# Altium footprint library SamacSys.PcbLib: 1008 footprints (part 47 of 63)
Each footprint in its own frame and in the unit in brackets; x right, y up, seen from the top. Pads: shape width x height; smd on the part's side, far side on the other; paste and mask are expansions set on the pad; w line width, h text height; cw(c..) or ccw(c..) is an arc to the next point about the centre after c.
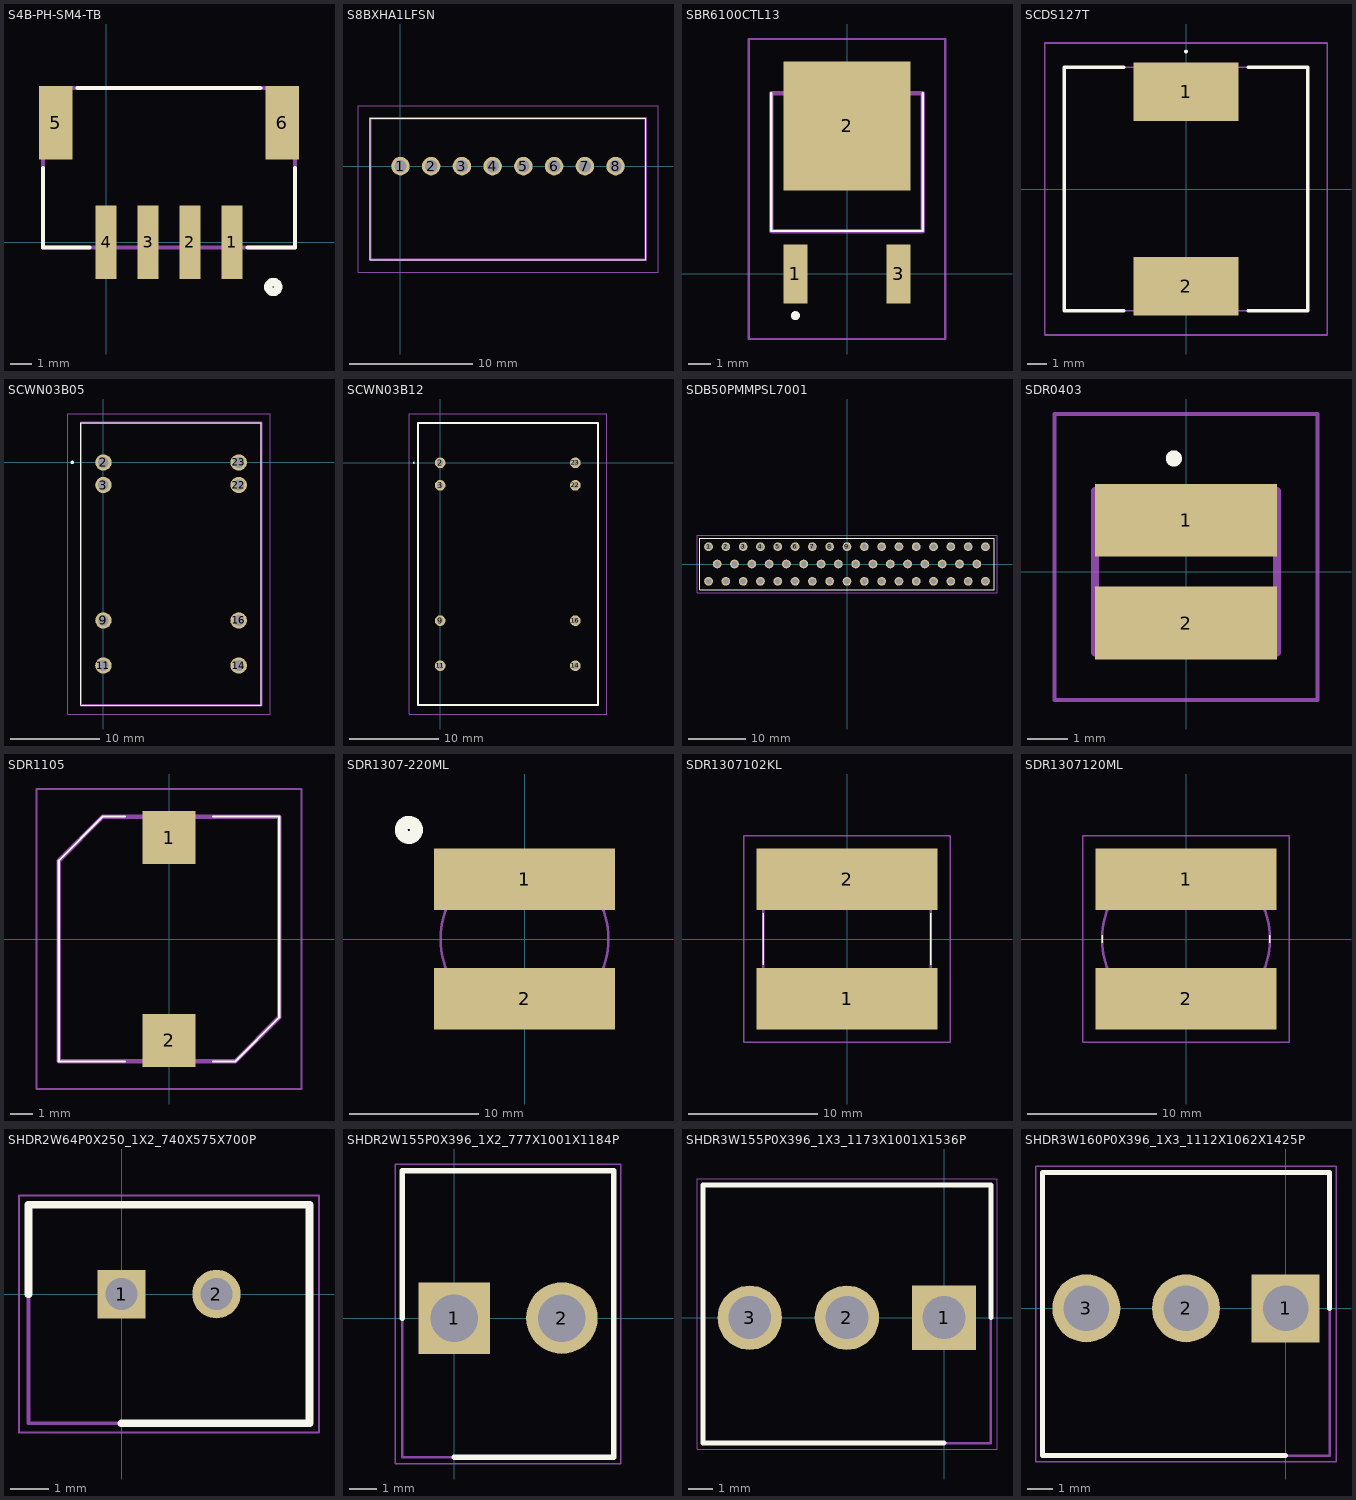
[diagram p46: the footprints below, top view; thin cyan lines are the x and y axes]

## S4B-PH-SM4-TB [mm]
pads (6):
  rect 1x3.5 smd: 1(6,0) 2(4,0) 3(2,0) 4(0,0)
  rect 1.6x3.5 smd: 5(-2.4,5.7) 6(8.4,5.7)
Top Overlay:
  circle w0.4: c7.967,-2.128 r0.237
  lines w0.2: -3,3.55 -3,-0.25 -0.79,-0.25 ; -1.355,7.35 7.347,7.35 ; 6.753,-0.25 9,-0.25 9,3.55
Assembly:
  lines w0.2: -3,-0.25 9,-0.25 9,7.35 -3,7.35 -3,-0.25
3D body "S4B-PH-SM4-TB_LF__SN_.stp": height 5.6, standoff 0, extent -2.95,-1.427 8.95,7.44

## S8BXHA1LFSN [mm]
pads (8):
  round 1.5 hole 1: 1(0,0) 2(2.5,0) 3(5,0) 4(7.5,0) 5(10,0) 6(12.5,0) 7(15,0) 8(17.5,0)
Top Overlay:
  lines w0.1: -2.45,-7.62 -2.45,3.9 19.95,3.9 19.95,-7.62 -2.45,-7.62
Assembly:
  lines w0.2: -2.45,-7.6 -2.45,3.9 19.95,3.9 19.95,-7.6 -2.45,-7.6
Countryard:
  lines w0.1: -3.45,-8.62 -3.45,4.9 20.95,4.9 20.95,-8.62 -3.45,-8.62
3D body "S8B-XH-A-1.step": height 5.75, standoff -3.5, extent -2.45,-7.6 19.95,3.9

## SBR6100CTL13 [mm]
pads (3):
  rect 1.06x2.6 smd: 1(-2.286,0) 3(2.286,0)
  rect 5.632x5.7 smd: 2(0,6.55)
Top Overlay:
  lines w0.1: -3.35,8 -3.35,1.9 3.35,1.9 3.35,8
  lines w0.2: -2.386,-1.844 cw(c-2.286,-1.844) -2.186,-1.844 cw(c-2.286,-1.844) -2.386,-1.844
Assembly:
  lines w0.2: -3.35,1.9 3.35,1.9 3.35,8 -3.35,8 -3.35,1.9
Countryard:
  lines w0.1: -4.35,-2.879 4.35,-2.879 4.35,10.4 -4.35,10.4 -4.35,-2.879
3D body "DMP4010SK3Q-13.stp": height 2.49, standoff 0, extent -3.35,-1.194 3.35,8.837

## SCDS127T [mm]
height 8
pads (2):
  rect 5.4x3 smd: 1(0,5) 2(0,-5)
Top Overlay:
  lines w0.1: 0,7 cw(c0,7.05) 0,7.1 cw(c0,7.05) 0,7
  lines w0.2: -3.2,-6.25 -6.25,-6.25 -6.25,6.25 -3.2,6.25 ; 3.2,-6.25 6.25,-6.25 6.25,6.25 3.2,6.25
Assembly:
  lines w0.1: -6.25,-6.25 -6.25,6.25 6.25,6.25 6.25,-6.25 -6.25,-6.25
Countryard:
  lines w0.1: -7.25,-7.5 -7.25,7.5 7.25,7.5 7.25,-7.5 -7.25,-7.5
3D body "SCDS127T-101M-N.stp": height 8.1, standoff 0, extent -6.25,-6.25 6.25,6.25

## SCWN03B05 [mm]
pads (8):
  round 1.85 hole 1.2: 2(0,0) 3(0,-2.54) 9(0,-17.8) 11(0,-22.88) 14(15.24,-22.88) 16(15.24,-17.8) 22(15.24,-2.54) 23(15.24,0)
Top Overlay:
  lines w0.1: -2.54,-27.34 -2.54,4.46 17.78,4.46 17.78,-27.34 -2.54,-27.34
  lines w0.2: -3.5,-0.1 ccw(c-3.5,0) -3.5,0.1 ccw(c-3.5,0) -3.5,-0.1
Assembly:
  lines w0.254: -2.53,-27.34 -2.53,4.46 17.77,4.46 17.77,-27.34 -2.53,-27.34
Countryard:
  lines w0.1: -4,-28.34 -4,5.46 18.78,5.46 18.78,-28.34 -4,-28.34
3D body "SCWN03B-05.stp": height 11.9, standoff -2.1, extent -2.76,-27.22 17.54,4.58

## SCWN03B12 [mm]
pads (8):
  round 1.2 hole 0.7: 2(0,0) 3(0,-2.54) 9(0,-17.78) 11(0,-22.86) 14(15.24,-22.86) 16(15.24,-17.78) 22(15.24,-2.54) 23(15.24,0)
Top Overlay:
  lines w0.1: -3,0 ccw(c-2.95,0) -2.9,0 ccw(c-2.95,0) -3,0
  lines w0.2: -2.5,-27.3 17.8,-27.3 17.8,4.5 -2.5,4.5 -2.5,-27.3
Assembly:
  lines w0.1: -2.5,-27.3 17.8,-27.3 17.8,4.5 -2.5,4.5 -2.5,-27.3
Countryard:
  lines w0.1: -3.5,-28.3 18.8,-28.3 18.8,5.5 -3.5,5.5 -3.5,-28.3
3D body "SCWN03B-12.stp": height 10.8, standoff -5, extent -2.5,-27.3 17.8,4.5

## SDB50PMMPSL7001 [mm]
pads (50):
  round 1.515 hole 1.01: 1(-24,3) 2(-21,3) 3(-18,3) 4(-15,3) 5(-12,3) 6(-9,3) 7(-6,3) 8(-3,3) 9(0,3) 10(3,3) 11(6,3) 12(9,3) 13(12,3) 14(15,3) 15(18,3) 16(21,3) 17(24,3) 18(-22.5,0) 19(-19.5,0) 20(-16.5,0) 21(-13.5,0) 22(-10.5,0) 23(-7.5,0) 24(-4.5,0) 25(-1.5,0) 26(1.5,0) 27(4.5,0) 28(7.5,0) 29(10.5,0) 30(13.5,0) 31(16.5,0) 32(19.5,0) 33(22.5,0) 34(-24,-3) 35(-21,-3) 36(-18,-3) 37(-15,-3) 38(-12,-3) 39(-9,-3) 40(-6,-3) 41(-3,-3) 42(0,-3) 43(3,-3) 44(6,-3) 45(9,-3) 46(12,-3) 47(15,-3) 48(18,-3) 49(21,-3) 50(24,-3)
Top Overlay:
  lines w0.2: -25.5,-4.5 -25.5,4.5 25.5,4.5 25.5,-4.5 -25.5,-4.5
Countryard:
  lines w0.1: -26,-5 -26,5 26,5 26,-5 -26,-5

## SDR0403 [mm]
height 3.2
pads (2):
  rect 4.5x1.8 smd: 1(0,1.27) 2(0,-1.27)
Top Overlay:
  lines w0.2: -0.4,2.8 cw(c-0.3,2.8) -0.2,2.8 cw(c-0.3,2.8) -0.4,2.8
Assembly:
  lines w0.2: -2.25,-2 2.25,-2 2.25,2 -2.25,2 -2.25,-2
Countryard:
  lines w0.1: -3.25,-3.17 3.25,-3.17 3.25,3.9 -3.25,3.9 -3.25,-3.17
3D body "SDR0403-2R2ML.stp": height 3.2, standoff 0, extent -2.25,-2.309 2.25,2.169

## SDR1105 [mm]
height 5
pads (2):
  rect 2.4x2.4 smd: 1(0,4.6) 2(0,-4.6)
Top Overlay:
  lines w0.1: -2,-5.55 -5,-5.55 -5,3.55 -3,5.55 -2,5.55 ; 2,-5.55 3,-5.55 5,-3.55 5,5.55 2,5.55
Assembly:
  lines w0.2: -5,-5.55 -5,3.55 -3,5.55 5,5.55 5,-3.55 3,-5.55 -5,-5.55
Countryard:
  lines w0.1: -6,-6.8 6,-6.8 ; -6,-6.8 -6,6.8 ; -6,-6.8 6,-6.8 ; -6,-6.8 -6,6.8 ; -6,6.8 6,6.8 ; -6,6.8 6,6.8 ; 6,-6.8 6,6.8 ; 6,-6.8 6,6.8
3D body "SDR1105-220ML.stp": height 4.8, standoff 0, extent -5,-5.55 5,5.55

## SDR1307-220ML [mm]
pads (2):
  rect 14x4.75 smd: 1(0,4.625) 2(0,-4.625)
Top Overlay:
  circle w1: c-8.967,8.454 r0.591
Assembly:
  circle w0.2: c0,0 r6.5
3D body "SDR1307-180ML.stp": height 7, standoff 0, extent -6.5,-6.18 6.5,6.82

## SDR1307102KL [mm]
pads (2):
  rect 14x4.75 smd: 1(0,-4.625) 2(0,4.625)
Top Overlay:
  lines w0.1: -6.5,-2 -6.5,2 ; 6.5,-2 6.5,2
Assembly:
  lines w0.2: -6.5,-6.5 6.5,-6.5 6.5,6.5 -6.5,6.5 -6.5,-6.5
Countryard:
  lines w0.1: -8,-8 8,-8 8,8 -8,8 -8,-8
3D body "SDR1307-121KL.stp": height 7, standoff 0, extent -6.5,-6.5 6.5,6.5

## SDR1307120ML [mm]
pads (2):
  rect 14x4.75 smd: 1(0,4.625) 2(0,-4.625)
Top Overlay:
  lines w0.1: -6.5,-0.3 -6.5,0.3 ; 6.5,-0.3 6.5,0.3
Assembly:
  lines w0.2: -6.5,0 cw(c0,0) 6.5,0 cw(c0,0) -6.5,0
Countryard:
  lines w0.1: -8,-8 8,-8 8,8 -8,8 -8,-8
3D body "SDR1307-150ML.stp": height 7, standoff 0, extent -6.5,-6.5 6.5,6.5

## SHDR2W64P0X250_1X2_740X575X700P [mm]
pads (2):
  rect 1.275x1.275 hole 0.85: 1(0,0)
  round 1.275 hole 0.85: 2(2.5,0)
Top Overlay:
  lines w0.2: -2.45,0 -2.45,2.35 4.95,2.35 4.95,-3.4 0,-3.4
Assembly:
  lines w0.1: -2.45,-3.4 -2.45,2.35 4.95,2.35 4.95,-3.4 -2.45,-3.4
Countryard:
  lines w0.05: -2.7,-3.65 -2.7,2.6 5.2,2.6 5.2,-3.65 -2.7,-3.65
3D body "B2B-XH-A__LF__SN_.stp": height 7, standoff -3.4, extent -2.45,-2.875 4.95,2.875

## SHDR2W155P0X396_1X2_777X1001X1184P [mm]
pads (2):
  rect 2.625x2.625 hole 1.75: 1(0,0)
  round 2.625 hole 1.75: 2(3.96,0)
Top Overlay:
  lines w0.2: -1.905,0 -1.905,5.41 5.865,5.41 5.865,-5.11 0,-5.11
Assembly:
  lines w0.1: -1.905,-5.11 5.865,-5.11 5.865,5.41 -1.905,5.41 -1.905,-5.11
Countryard:
  lines w0.05: -2.155,-5.36 6.115,-5.36 6.115,5.66 -2.155,5.66 -2.155,-5.36
3D body "26-60-4020.stp": height 14.73, standoff -3.56, extent -1.906,-4.853 5.866,5.154

## SHDR3W155P0X396_1X3_1173X1001X1536P [mm]
pads (3):
  rect 2.625x2.625 hole 1.75: 1(0,0)
  round 2.625 hole 1.75: 2(-3.96,0) 3(-7.92,0)
Top Overlay:
  lines w0.2: 0,-5.11 -9.82,-5.11 -9.82,5.41 1.91,5.41 1.91,0
Assembly:
  lines w0.1: -9.82,-5.11 -9.82,5.41 1.91,5.41 1.91,-5.11 -9.82,-5.11
Countryard:
  lines w0.05: -10.07,-5.36 -10.07,5.66 2.16,5.66 2.16,-5.36 -10.07,-5.36
3D body "26-60-4030.stp": height 14.7, standoff -3.59, extent -9.817,-5.113 1.917,4.894

## SHDR3W160P0X396_1X3_1112X1062X1425P [mm]
pads (3):
  rect 2.7x2.7 hole 1.8: 1(0,0)
  round 2.7 hole 1.8: 2(-3.96,0) 3(-7.92,0)
Top Overlay:
  lines w0.2: 0,-5.85 -9.67,-5.85 -9.67,5.4 1.75,5.4 1.75,0
Assembly:
  lines w0.1: -9.67,-5.85 -9.67,5.4 1.75,5.4 1.75,-5.85 -9.67,-5.85
Countryard:
  lines w0.05: -9.92,-6.1 -9.92,5.65 2,5.65 2,-6.1 -9.92,-6.1
3D body "09-65-2038.stp": height 13.85, standoff -3.6, extent -9.52,-5.6 1.6,5.15